# Altium schematic symbol library DRTR5V0U1LPQ-7B.SchLib: 1 symbol
Pins are listed as number, name and electrical type; pins without a type are passive.

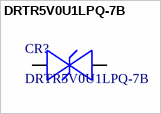
[diagram p0: symbol DRTR5V0U1LPQ-7B]

## DRTR5V0U1LPQ-7B
designator CR?
Description; Manufacturer_Name: Diodes Inc; Copyright: Copyright (C) 2025 Ultra Librarian. All rights reserved.; Manufacturer_Part_Number: DRTR5V0U1LPQ-7B; RefDes: RefDes; Type: Type
footprint X1-DFN1006-2_P6X1_DIO
pins: 1, 2